# Altium footprint library Robert_.PcbLib: 95 footprints (part 6 of 6)
Each footprint in its own frame and in the unit in brackets; x right, y up, seen from the top. Pads: shape width x height; smd on the part's side, far side on the other; paste and mask are expansions set on the pad; w line width, h text height; cw(c..) or ccw(c..) is an arc to the next point about the centre after c.
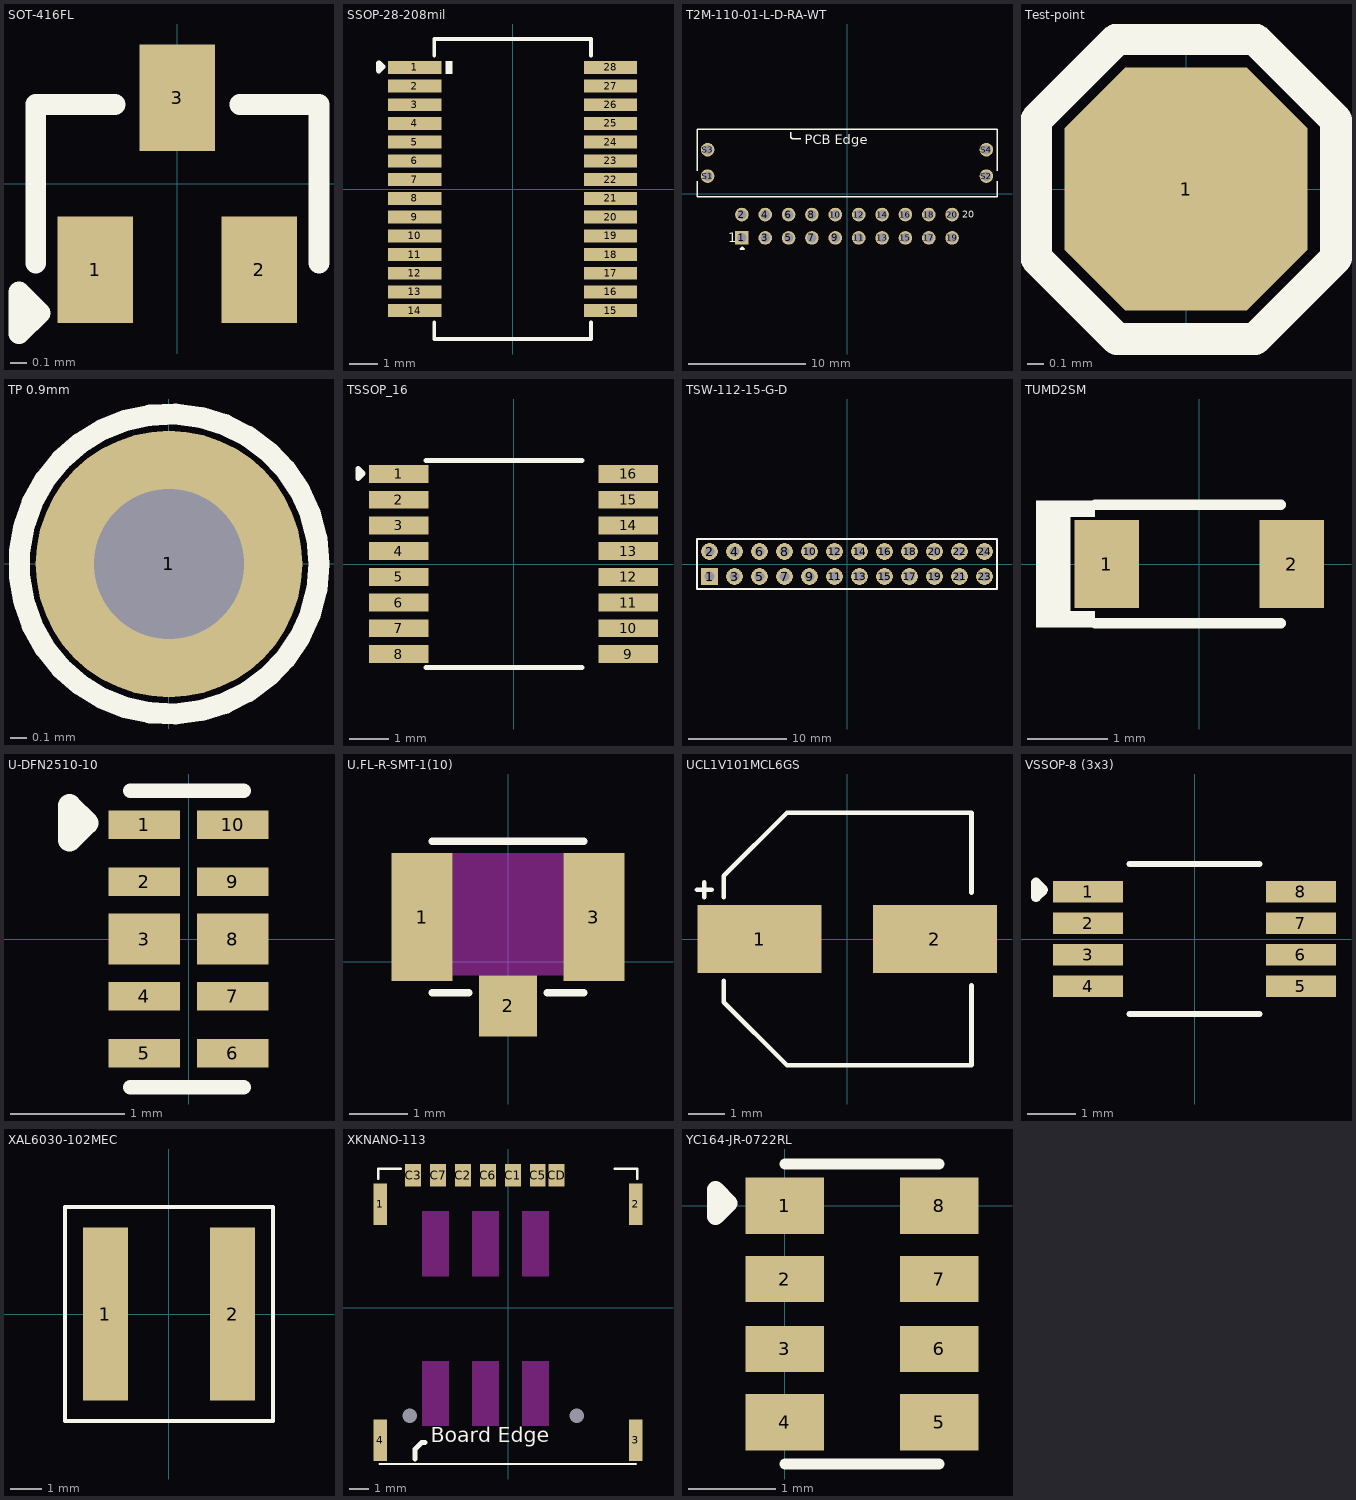
[diagram p5: the footprints below, top view; thin cyan lines are the x and y axes]

## SOT-416FL [mm]
pads (3):
  rect 0.46x0.65 smd: 1(-0.5,-0.525) 2(0.5,-0.525) 3(0,0.525)
Top Overlay:
  lines w0.127: -0.864,-0.483 -0.864,0.483 -0.381,0.483 ; 0.381,0.483 0.864,0.483 0.864,-0.483 ; -0.965,-0.914 -0.965,-0.66 -0.838,-0.787 -0.965,-0.914
3D body "TRANS_2SC4617EB_ROM.step": height 0.89, standoff 0, extent -0.8,-0.851 0.8,0.851

## SSOP-28-208mil [mm]
pads (28):
  rect 1.85x0.45 smd: 1(-3.4,4.225) 2(-3.4,3.575) 3(-3.4,2.925) 4(-3.4,2.275) 5(-3.4,1.625) 6(-3.4,0.975) 7(-3.4,0.325) 8(-3.4,-0.325) 9(-3.4,-0.975) 10(-3.4,-1.625) 11(-3.4,-2.275) 12(-3.4,-2.925) 13(-3.4,-3.575) 14(-3.4,-4.225) 15(3.4,-4.225) 16(3.4,-3.575) 17(3.4,-2.925) 18(3.4,-2.275) 19(3.4,-1.625) 20(3.4,-0.975) 21(3.4,-0.325) 22(3.4,0.325) 23(3.4,0.975) 24(3.4,1.625) 25(3.4,2.275) 26(3.4,2.925) 27(3.4,3.575) 28(3.4,4.225)
Top Overlay:
  rectangle: -2.337,3.988 -2.083,4.445
  lines w0.127: -2.718,-4.623 -2.718,-5.207 2.718,-5.207 2.718,-4.623 ; -2.718,4.623 -2.718,5.207 2.718,5.207 2.718,4.623
  lines w0.2: -4.648,4.115 -4.648,4.369 -4.521,4.242 -4.648,4.115
3D body "User Library-SSOP-28-1.step": height 2.15, standoff 0, extent -3.878,-5.165 3.878,5.165

## T2M-110-01-L-D-RA-WT [mm]
pads (24):
  rect 1.163x1.163 hole 0.813: 1(-9,-3.775)
  round 1.163 hole 0.813: 2(-9,-1.775) 3(-7,-3.775) 4(-7,-1.775) 5(-5,-3.775) 6(-5,-1.775) 7(-3,-3.775) 8(-3,-1.775) 9(-1,-3.775) 10(-1,-1.775) 11(1,-3.775) 12(1,-1.775) 13(3,-3.775) 14(3,-1.775) 15(5,-3.775) 16(5,-1.775) 17(7,-3.775) 18(7,-1.775) 19(9,-3.775) 20(9,-1.775) S1(-11.925,1.515) S2(11.925,1.515) S3(-11.925,3.775) S4(11.925,3.775)
Top Overlay:
  lines w0.127: -12.837,1.078 -12.837,-0.245 12.837,-0.245 12.837,1.078 ; -12.837,1.952 -12.837,5.545 12.837,5.545 12.837,1.952 ; -4.826,5.283 -4.826,4.851 -4.674,4.699 -3.962,4.699
  lines w0.2: -9.093,-4.724 -8.966,-4.597 -8.839,-4.724 -9.093,-4.724
  text "PCB Edge" at -3.635,4.251 h0.8
  text "20" at 9.878,-2.034 h0.6
  text "1" at -10.183,-4.138 h0.8
3D body "T2M-110-01-L-D-RA-WT.stp": height 7.42, standoff -2.31, extent -12.837,-4.023 12.837,5.537

## Test-point [mil]
pads (1):
  oct 60x60 smd: 1(0,0)
Top Overlay:
  lines w7.87: -37,-17 -17,-37 17,-37 37,-17 37,17 17,37 -17,37 -37,17 -37,-17

## TP 0.9mm [mm]
pads (1):
  round 1.6 hole 0.9: 1(0,0)
Top Overlay:
  circle w0.127: c0,0 r0.9

## TSSOP_16 [mm]
pads (16):
  rect 1.5x0.45 smd: 1(-2.9,2.275) 2(-2.9,1.625) 3(-2.9,0.975) 4(-2.9,0.325) 5(-2.9,-0.325) 6(-2.9,-0.975) 7(-2.9,-1.625) 8(-2.9,-2.275) 9(2.9,-2.275) 10(2.9,-1.625) 11(2.9,-0.975) 12(2.9,-0.325) 13(2.9,0.325) 14(2.9,0.975) 15(2.9,1.625) 16(2.9,2.275)
Top Overlay:
  lines w0.127: -2.21,-2.612 1.727,-2.612 ; -2.21,2.612 1.727,2.612 ; -3.933,2.159 -3.806,2.286 -3.933,2.413 -3.933,2.159
3D body "User Library-TSSOP-16-for-ON-SEMI-MC74HC595ADTR2G-Text.step": height 1.23, standoff 0.01, extent -3.2,-2.55 3.2,2.55

## TSW-112-15-G-D [mm]
pads (24):
  rect 1.7x1.7 hole 1.02: 1(-13.97,-1.27)
  round 1.7 hole 1.02: 2(-13.97,1.27) 3(-11.43,-1.27) 4(-11.43,1.27) 5(-8.89,-1.27) 6(-8.89,1.27) 7(-6.35,-1.27) 8(-6.35,1.27) 9(-3.81,-1.27) 10(-3.81,1.27) 11(-1.27,-1.27) 12(-1.27,1.27) 13(1.27,-1.27) 14(1.27,1.27) 15(3.81,-1.27) 16(3.81,1.27) 17(6.35,-1.27) 18(6.35,1.27) 19(8.89,-1.27) 20(8.89,1.27) 21(11.43,-1.27) 22(11.43,1.27) 23(13.97,-1.27) 24(13.97,1.27)
Top Overlay:
  lines w0.2: -15.24,-2.54 -15.24,2.54 15.24,2.54 15.24,-2.54 -15.24,-2.54
3D body "TSW-112-15-G-D.stp": height 15.75, standoff -2.79, extent -15.24,-2.54 15.24,2.54

## TUMD2SM [mm]
pads (2):
  rect 0.8x1.1 smd: 1(-1.15,0) 2(1.15,0)
Top Overlay:
  rectangle: -2.032,-0.787 -1.295,-0.584
  rectangle: -2.032,-0.711 -1.6,0.66
  rectangle: -2.032,0.584 -1.295,0.787
  lines w0.127: -1.295,-0.737 1.016,-0.737 ; -1.295,0.737 1.016,0.737
3D body "DIO_RRE02VSM_ROM.step": height 0.82, standoff 0, extent -1.346,-0.698 1.346,0.698

## U-DFN2510-10 [mm]
pads (10):
  rect 0.625x0.25 smd: 1(-0.387,1) 2(-0.387,0.5) 4(-0.387,-0.5) 5(-0.387,-1) 6(0.387,-1) 7(0.387,-0.5) 9(0.387,0.5) 10(0.387,1)
  rect 0.625x0.45 smd: 3(-0.387,0) 8(0.387,0)
Top Overlay:
  lines w0.127: -0.508,-1.295 0.483,-1.295 ; -0.508,1.295 0.483,1.295
  lines w0.2: -1.041,0.864 -0.889,1.016 -1.041,1.168 -1.041,0.864
3D body "DFN2510-10_STP.stp": height 0.57, standoff -0.01, extent -0.5,-1.25 0.5,1.25

## U.FL-R-SMT-1(10) [mm]
pads (3):
  rect 1.05x2.2 smd: 1(-1.475,0.763) 3(1.475,0.763)
  rect 1x1.05 smd: 2(0,-0.763)
Top Overlay:
  lines w0.127: -1.3,-0.537 -0.67,-0.537 ; -1.3,2.063 1.3,2.063 ; 0.67,-0.537 1.3,-0.537
Keep-Out Layer:
  region: 0.95,-0.238 -0.95,-0.238 -0.95,1.863 0.95,1.863
3D body "U.FL-R-SMT-1(10)--3DModel-STEP-56544.STEP": height 1.25, standoff 0, extent -1.5,-0.763 1.5,2.337

## UCL1V101MCL6GS [mm]
pads (2):
  rect 3.4x1.85 smd: 1(-2.4,0) 2(2.4,0)
Top Overlay:
  lines w0.127: -4.115,1.346 -3.708,1.346 ; -3.912,1.143 -3.912,1.549 ; -3.378,-1.143 -3.378,-1.727 -1.651,-3.454 3.404,-3.454 3.404,-1.27 ; -3.378,1.143 -3.378,1.727 -1.651,3.454 3.404,3.454 3.404,1.27
3D body "UCL1V101MCL6GS.stp": height 8, standoff 0, extent -3.75,-3.4 3.75,3.4

## VSSOP-8 (3x3) [mm]
pads (8):
  rect 1.45x0.45 smd: 1(-2.2,0.975) 2(-2.2,0.325) 3(-2.2,-0.325) 4(-2.2,-0.975) 5(2.2,-0.975) 6(2.2,-0.325) 7(2.2,0.325) 8(2.2,0.975)
Top Overlay:
  lines w0.127: -1.346,-1.549 1.346,-1.549 ; -1.346,1.549 1.346,1.549
  lines w0.2: -3.277,0.864 -3.277,1.168 -3.124,1.016 -3.277,0.864
3D body "DGK0008A.stp": height 1.1, standoff 0, extent -2.451,-1.499 2.451,1.499

## XAL6030-102MEC [mm]
pads (2):
  rect 1.43x5.5 smd: 1(-2.02,0) 2(2.02,0)
Top Overlay:
  lines w0.127: -3.302,-3.404 3.302,-3.404 3.302,3.404 -3.302,3.404 -3.302,-3.404
3D body "Coilcraft-XAL6030.step": height 3, standoff -0.1, extent -3.28,-3.38 3.28,3.38

## XKNANO-113 [mm]
pads (13):
  rect 0.7x2.1 smd: 1(-6.5,5.26) 2(6.5,5.26) 3(6.5,-6.74) 4(-6.5,-6.74)
  rect 0.8x1.14 smd: C1(0.25,6.74) C2(-2.29,6.74) C3(-4.83,6.74) C5(1.52,6.74) C6(-1.02,6.74) C7(-3.56,6.74) CD(2.47,6.74)
  rect 0x0 hole 0.75 unplated: MH(-5,-5.49) MH(3.5,-5.49)
Top Overlay:
  lines w0.127: -6.604,6.553 -6.604,7.061 -5.461,7.061 ; -6.528,-7.95 6.502,-7.95 ; 5.436,7.061 6.579,7.061 6.579,6.553
  lines w0.254: -4.724,-7.696 -4.724,-7.188 -4.394,-6.858 -4.216,-6.858
  text "Board Edge" at -3.937,-6.833 h0.76
Keep-Out Layer:
  rectangle: -4.366,-6.029 -2.995,-2.701
  rectangle: -1.826,-6.029 -0.455,-2.701
  rectangle: 0.714,-6.029 2.085,-2.701
  rectangle: -4.366,1.591 -2.995,4.919
  rectangle: -1.826,1.591 -0.455,4.919
  rectangle: 0.714,1.591 2.085,4.919
3D body "xb-xknano-113.stp": height 1.37, standoff -0.4, extent -6.553,-7.569 6.537,7.011

## YC164-JR-0722RL [mm]
pads (8):
  rect 0.9x0.65 smd: 1(0,0) 4(0,-2.48) 5(1.77,-2.48) 8(1.77,0)
  rect 0.9x0.53 smd: 2(0,-0.84) 3(0,-1.64) 6(1.77,-1.64) 7(1.77,-0.84)
Top Overlay:
  lines w0.127: 0.005,-2.958 1.765,-2.958 ; 0.005,0.478 1.765,0.478
  lines w0.2: -0.791,-0.122 -0.791,0.182 -0.639,0.03 -0.791,-0.122
3D body "YC164-JR-070RL.STEP": height 0.7, standoff 0, extent 0.085,-2.84 1.685,0.36